# Altium footprint library 2.10-LQFP封装.PcbLib: 97 footprints (part 7 of 7)
Each footprint in its own frame and in the unit in brackets; x right, y up, seen from the top. Pads: shape width x height; smd on the part's side, far side on the other; paste and mask are expansions set on the pad; w line width, h text height; cw(c..) or ccw(c..) is an arc to the next point about the centre after c.
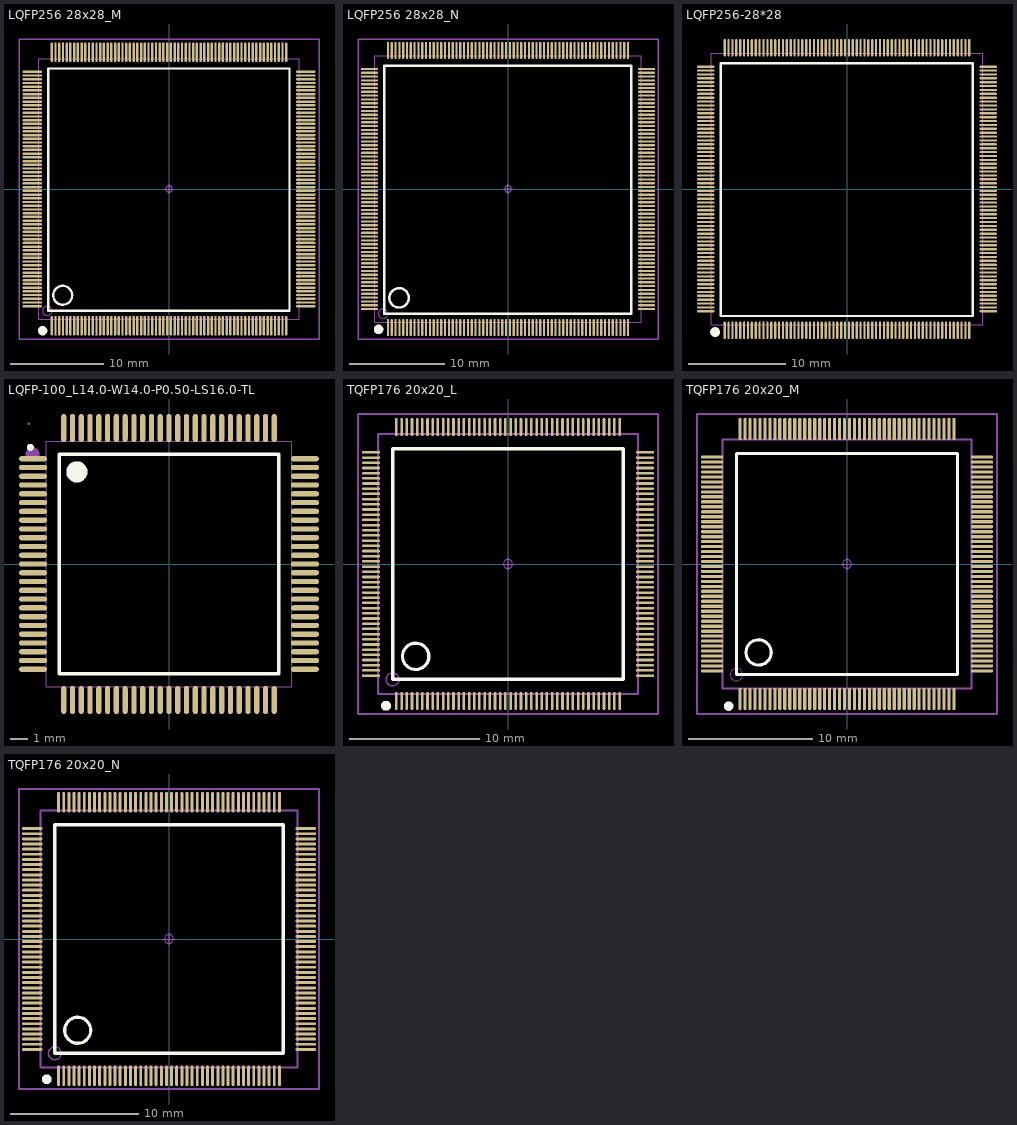
[diagram p6: the footprints below, top view; thin cyan lines are the x and y axes]

## LQFP256 28x28_M [mm] "256脚，体宽28x28mm，脚距0.4mm      淘宝ID:黄晶宝石"
pads (256):
  oval 0.26x2.1 smd: 1(-12.6,-14.702) 2(-12.2,-14.702) 3(-11.8,-14.702) 4(-11.4,-14.702) 5(-11,-14.702) 6(-10.6,-14.702) 7(-10.2,-14.702) 8(-9.8,-14.702) 9(-9.4,-14.702) 10(-9,-14.702) 11(-8.6,-14.702) 12(-8.2,-14.702) 13(-7.8,-14.702) 14(-7.4,-14.702) 15(-7,-14.702) 16(-6.6,-14.702) 17(-6.2,-14.702) 18(-5.8,-14.702) 19(-5.4,-14.702) 20(-5,-14.702) 21(-4.6,-14.702) 22(-4.2,-14.702) 23(-3.8,-14.702) 24(-3.4,-14.702) 25(-3,-14.702) 26(-2.6,-14.702) 27(-2.2,-14.702) 28(-1.8,-14.702) 29(-1.4,-14.702) 30(-1,-14.702) 31(-0.6,-14.702) 32(-0.2,-14.702) 33(0.2,-14.702) 34(0.6,-14.702) 35(1,-14.702) 36(1.4,-14.702) 37(1.8,-14.702) 38(2.2,-14.702) 39(2.6,-14.702) 40(3,-14.702) 41(3.4,-14.702) 42(3.8,-14.702) 43(4.2,-14.702) 44(4.6,-14.702) 45(5,-14.702) 46(5.4,-14.702) 47(5.8,-14.702) 48(6.2,-14.702) 49(6.6,-14.702) 50(7,-14.702) 51(7.4,-14.702) 52(7.8,-14.702) 53(8.2,-14.702) 54(8.6,-14.702) 55(9,-14.702) 56(9.4,-14.702) 57(9.8,-14.702) 58(10.2,-14.702) 59(10.6,-14.702) 60(11,-14.702) 61(11.4,-14.702) 62(11.8,-14.702) 63(12.2,-14.702) 64(12.6,-14.702) 129(12.6,14.702) 130(12.2,14.702) 131(11.8,14.702) 132(11.4,14.702) 133(11,14.702) 134(10.6,14.702) 135(10.2,14.702) 136(9.8,14.702) 137(9.4,14.702) 138(9,14.702) 139(8.6,14.702) 140(8.2,14.702) 141(7.8,14.702) 142(7.4,14.702) 143(7,14.702) 144(6.6,14.702) 145(6.2,14.702) 146(5.8,14.702) 147(5.4,14.702) 148(5,14.702) 149(4.6,14.702) 150(4.2,14.702) 151(3.8,14.702) 152(3.4,14.702) 153(3,14.702) 154(2.6,14.702) 155(2.2,14.702) 156(1.8,14.702) 157(1.4,14.702) 158(1,14.702) 159(0.6,14.702) 160(0.2,14.702) 161(-0.2,14.702) 162(-0.6,14.702) 163(-1,14.702) 164(-1.4,14.702) 165(-1.8,14.702) 166(-2.2,14.702) 167(-2.6,14.702) 168(-3,14.702) 169(-3.4,14.702) 170(-3.8,14.702) 171(-4.2,14.702) 172(-4.6,14.702) 173(-5,14.702) 174(-5.4,14.702) 175(-5.8,14.702) 176(-6.2,14.702) 177(-6.6,14.702) 178(-7,14.702) 179(-7.4,14.702) 180(-7.8,14.702) 181(-8.2,14.702) 182(-8.6,14.702) 183(-9,14.702) 184(-9.4,14.702) 185(-9.8,14.702) 186(-10.2,14.702) 187(-10.6,14.702) 188(-11,14.702) 189(-11.4,14.702) 190(-11.8,14.702) 191(-12.2,14.702) 192(-12.6,14.702)
  oval 2.1x0.26 smd: 65(14.702,-12.6) 66(14.702,-12.2) 67(14.702,-11.8) 68(14.702,-11.4) 69(14.702,-11) 70(14.702,-10.6) 71(14.702,-10.2) 72(14.702,-9.8) 73(14.702,-9.4) 74(14.702,-9) 75(14.702,-8.6) 76(14.702,-8.2) 77(14.702,-7.8) 78(14.702,-7.4) 79(14.702,-7) 80(14.702,-6.6) 81(14.702,-6.2) 82(14.702,-5.8) 83(14.702,-5.4) 84(14.702,-5) 85(14.702,-4.6) 86(14.702,-4.2) 87(14.702,-3.8) 88(14.702,-3.4) 89(14.702,-3) 90(14.702,-2.6) 91(14.702,-2.2) 92(14.702,-1.8) 93(14.702,-1.4) 94(14.702,-1) 95(14.702,-0.6) 96(14.702,-0.2) 97(14.702,0.2) 98(14.702,0.6) 99(14.702,1) 100(14.702,1.4) 101(14.702,1.8) 102(14.702,2.2) 103(14.702,2.6) 104(14.702,3) 105(14.702,3.4) 106(14.702,3.8) 107(14.702,4.2) 108(14.702,4.6) 109(14.702,5) 110(14.702,5.4) 111(14.702,5.8) 112(14.702,6.2) 113(14.702,6.6) 114(14.702,7) 115(14.702,7.4) 116(14.702,7.8) 117(14.702,8.2) 118(14.702,8.6) 119(14.702,9) 120(14.702,9.4) 121(14.702,9.8) 122(14.702,10.2) 123(14.702,10.6) 124(14.702,11) 125(14.702,11.4) 126(14.702,11.8) 127(14.702,12.2) 128(14.702,12.6) 193(-14.702,12.6) 194(-14.702,12.2) 195(-14.702,11.8) 196(-14.702,11.4) 197(-14.702,11) 198(-14.702,10.6) 199(-14.702,10.2) 200(-14.702,9.8) 201(-14.702,9.4) 202(-14.702,9) 203(-14.702,8.6) 204(-14.702,8.2) 205(-14.702,7.8) 206(-14.702,7.4) 207(-14.702,7) 208(-14.702,6.6) 209(-14.702,6.2) 210(-14.702,5.8) 211(-14.702,5.4) 212(-14.702,5) 213(-14.702,4.6) 214(-14.702,4.2) 215(-14.702,3.8) 216(-14.702,3.4) 217(-14.702,3) 218(-14.702,2.6) 219(-14.702,2.2) 220(-14.702,1.8) 221(-14.702,1.4) 222(-14.702,1) 223(-14.702,0.6) 224(-14.702,0.2) 225(-14.702,-0.2) 226(-14.702,-0.6) 227(-14.702,-1) 228(-14.702,-1.4) 229(-14.702,-1.8) 230(-14.702,-2.2) 231(-14.702,-2.6) 232(-14.702,-3) 233(-14.702,-3.4) 234(-14.702,-3.8) 235(-14.702,-4.2) 236(-14.702,-4.6) 237(-14.702,-5) 238(-14.702,-5.4) 239(-14.702,-5.8) 240(-14.702,-6.2) 241(-14.702,-6.6) 242(-14.702,-7) 243(-14.702,-7.4) 244(-14.702,-7.8) 245(-14.702,-8.2) 246(-14.702,-8.6) 247(-14.702,-9) 248(-14.702,-9.4) 249(-14.702,-9.8) 250(-14.702,-10.2) 251(-14.702,-10.6) 252(-14.702,-11) 253(-14.702,-11.4) 254(-14.702,-11.8) 255(-14.702,-12.2) 256(-14.702,-12.6)
Top Overlay:
  circle w0.508: c-13.589,-15.24 r0.25
  circle w0.254: c-11.43,-11.43 r1.016
  lines w0.254: -13,-13.081 12.954,-13.081 12.954,12.954 -13,12.954 -13,-13.081
Mechanical 13:
  circle w0.1: c-13.1,-13.1 r0.5
  lines w0.1: -14,-14 14,-14 14,14 -14,14 -14,-14
Mechanical 15:
  circle w0.05: c0,0 r0.35
  lines w0.05: -0.5,0 0.5,0 ; 0,-0.5 0,0.5
  lines w0.15: -16.129,-16.129 16.129,-16.129 16.129,16.129 -16.129,16.129 -16.129,-16.129
3D body "LQFP256-28x28.STEP": height 1.45, standoff -0.01, extent -15.003,-15.003 15.003,15.003

## LQFP256 28x28_N [mm] "256脚，体宽28x28mm，脚距0.4mm       淘宝ID:黄晶宝石"
pads (256):
  oval 0.23x1.8 smd: 1(-12.605,-14.548) 2(-12.205,-14.548) 3(-11.805,-14.548) 4(-11.405,-14.548) 5(-11.005,-14.548) 6(-10.605,-14.548) 7(-10.205,-14.548) 8(-9.805,-14.548) 9(-9.405,-14.548) 10(-9.005,-14.548) 11(-8.605,-14.548) 12(-8.205,-14.548) 13(-7.805,-14.548) 14(-7.405,-14.548) 15(-7.005,-14.548) 16(-6.605,-14.548) 17(-6.205,-14.548) 18(-5.805,-14.548) 19(-5.405,-14.548) 20(-5.005,-14.548) 21(-4.605,-14.548) 22(-4.205,-14.548) 23(-3.805,-14.548) 24(-3.405,-14.548) 25(-3.005,-14.548) 26(-2.605,-14.548) 27(-2.205,-14.548) 28(-1.805,-14.548) 29(-1.405,-14.548) 30(-1.005,-14.548) 31(-0.605,-14.548) 32(-0.205,-14.548) 33(0.195,-14.548) 34(0.595,-14.548) 35(0.995,-14.548) 36(1.395,-14.548) 37(1.795,-14.548) 38(2.195,-14.548) 39(2.595,-14.548) 40(2.995,-14.548) 41(3.395,-14.548) 42(3.795,-14.548) 43(4.195,-14.548) 44(4.595,-14.548) 45(4.995,-14.548) 46(5.395,-14.548) 47(5.795,-14.548) 48(6.195,-14.548) 49(6.595,-14.548) 50(6.995,-14.548) 51(7.395,-14.548) 52(7.795,-14.548) 53(8.195,-14.548) 54(8.595,-14.548) 55(8.995,-14.548) 56(9.395,-14.548) 57(9.795,-14.548) 58(10.195,-14.548) 59(10.595,-14.548) 60(10.995,-14.548) 61(11.395,-14.548) 62(11.795,-14.548) 63(12.195,-14.548) 64(12.595,-14.548) 129(12.595,14.551) 130(12.195,14.551) 131(11.795,14.551) 132(11.395,14.551) 133(10.995,14.551) 134(10.595,14.551) 135(10.195,14.551) 136(9.795,14.551) 137(9.395,14.551) 138(8.995,14.551) 139(8.595,14.551) 140(8.195,14.551) 141(7.795,14.551) 142(7.395,14.551) 143(6.995,14.551) 144(6.595,14.551) 145(6.195,14.551) 146(5.795,14.551) 147(5.395,14.551) 148(4.995,14.551) 149(4.595,14.551) 150(4.195,14.551) 151(3.795,14.551) 152(3.395,14.551) 153(2.995,14.551) 154(2.595,14.551) 155(2.195,14.551) 156(1.795,14.551) 157(1.395,14.551) 158(0.995,14.551) 159(0.595,14.551) 160(0.195,14.551) 161(-0.205,14.551) 162(-0.605,14.551) 163(-1.005,14.551) 164(-1.405,14.551) 165(-1.805,14.551) 166(-2.205,14.551) 167(-2.605,14.551) 168(-3.005,14.551) 169(-3.405,14.551) 170(-3.805,14.551) 171(-4.205,14.551) 172(-4.605,14.551) 173(-5.005,14.551) 174(-5.405,14.551) 175(-5.805,14.551) 176(-6.205,14.551) 177(-6.605,14.551) 178(-7.005,14.551) 179(-7.405,14.551) 180(-7.805,14.551) 181(-8.205,14.551) 182(-8.605,14.551) 183(-9.005,14.551) 184(-9.405,14.551) 185(-9.805,14.551) 186(-10.205,14.551) 187(-10.605,14.551) 188(-11.005,14.551) 189(-11.405,14.551) 190(-11.805,14.551) 191(-12.205,14.551) 192(-12.605,14.551)
  oval 1.8x0.23 smd: 65(14.544,-12.598) 66(14.544,-12.198) 67(14.544,-11.798) 68(14.544,-11.398) 69(14.544,-10.998) 70(14.544,-10.598) 71(14.544,-10.198) 72(14.544,-9.798) 73(14.544,-9.398) 74(14.544,-8.998) 75(14.544,-8.598) 76(14.544,-8.198) 77(14.544,-7.798) 78(14.544,-7.398) 79(14.544,-6.998) 80(14.544,-6.598) 81(14.544,-6.198) 82(14.544,-5.798) 83(14.544,-5.398) 84(14.544,-4.998) 85(14.544,-4.598) 86(14.544,-4.198) 87(14.544,-3.798) 88(14.544,-3.398) 89(14.544,-2.998) 90(14.544,-2.598) 91(14.544,-2.198) 92(14.544,-1.798) 93(14.544,-1.398) 94(14.544,-0.998) 95(14.544,-0.598) 96(14.544,-0.198) 97(14.544,0.202) 98(14.544,0.602) 99(14.544,1.002) 100(14.544,1.402) 101(14.544,1.802) 102(14.544,2.202) 103(14.544,2.602) 104(14.544,3.002) 105(14.544,3.402) 106(14.544,3.802) 107(14.544,4.202) 108(14.544,4.602) 109(14.544,5.002) 110(14.544,5.402) 111(14.544,5.802) 112(14.544,6.202) 113(14.544,6.602) 114(14.544,7.002) 115(14.544,7.402) 116(14.544,7.802) 117(14.544,8.202) 118(14.544,8.602) 119(14.544,9.002) 120(14.544,9.402) 121(14.544,9.802) 122(14.544,10.202) 123(14.544,10.602) 124(14.544,11.002) 125(14.544,11.402) 126(14.544,11.802) 127(14.544,12.202) 128(14.544,12.602) 193(-14.554,12.602) 194(-14.554,12.202) 195(-14.554,11.802) 196(-14.554,11.402) 197(-14.554,11.002) 198(-14.554,10.602) 199(-14.554,10.202) 200(-14.554,9.802) 201(-14.554,9.402) 202(-14.554,9.002) 203(-14.554,8.602) 204(-14.554,8.202) 205(-14.554,7.802) 206(-14.554,7.402) 207(-14.554,7.002) 208(-14.554,6.602) 209(-14.554,6.202) 210(-14.554,5.802) 211(-14.554,5.402) 212(-14.554,5.002) 213(-14.554,4.602) 214(-14.554,4.202) 215(-14.554,3.802) 216(-14.554,3.402) 217(-14.554,3.002) 218(-14.554,2.602) 219(-14.554,2.202) 220(-14.554,1.802) 221(-14.554,1.402) 222(-14.554,1.002) 223(-14.554,0.602) 224(-14.554,0.202) 225(-14.554,-0.198) 226(-14.554,-0.598) 227(-14.554,-0.998) 228(-14.554,-1.398) 229(-14.554,-1.798) 230(-14.554,-2.198) 231(-14.554,-2.598) 232(-14.554,-2.998) 233(-14.554,-3.398) 234(-14.554,-3.798) 235(-14.554,-4.198) 236(-14.554,-4.598) 237(-14.554,-4.998) 238(-14.554,-5.398) 239(-14.554,-5.798) 240(-14.554,-6.198) 241(-14.554,-6.598) 242(-14.554,-6.998) 243(-14.554,-7.398) 244(-14.554,-7.798) 245(-14.554,-8.198) 246(-14.554,-8.598) 247(-14.554,-8.998) 248(-14.554,-9.398) 249(-14.554,-9.798) 250(-14.554,-10.198) 251(-14.554,-10.598) 252(-14.554,-10.998) 253(-14.554,-11.398) 254(-14.554,-11.798) 255(-14.554,-12.198) 256(-14.554,-12.598)
Top Overlay:
  circle w0.508: c-13.589,-14.732 r0.25
  circle w0.254: c-11.435,-11.428 r1.016
  lines w0.254: -13.005,-13.079 12.949,-13.079 12.949,12.956 -13.005,12.956 -13.005,-13.079
Mechanical 13:
  circle w0.1: c-13.105,-13.098 r0.5
  lines w0.1: -14.005,-13.998 13.995,-13.998 13.995,14.002 -14.005,14.002 -14.005,-13.998
Mechanical 15:
  circle w0.05: c-0.005,0.002 r0.35
  lines w0.05: -0.505,0.002 0.495,0.002 ; -0.005,-0.498 -0.005,0.502
  lines w0.15: -15.748,-15.748 15.748,-15.748 15.748,15.748 -15.748,15.748 -15.748,-15.748
3D body "LQFP256-28x28.STEP": height 1.45, standoff -0.01, extent -15.008,-15.001 14.998,15.004

## LQFP256-28*28 [mm] "28x28mm，0.4mm          淘宝ID:黄晶宝石"
pads (256):
  oval 0.23x1.8 smd: 1(-12.605,-14.548) 2(-12.205,-14.548) 3(-11.805,-14.548) 4(-11.405,-14.548) 5(-11.005,-14.548) 6(-10.605,-14.548) 7(-10.205,-14.548) 8(-9.805,-14.548) 9(-9.405,-14.548) 10(-9.005,-14.548) 11(-8.605,-14.548) 12(-8.205,-14.548) 13(-7.805,-14.548) 14(-7.405,-14.548) 15(-7.005,-14.548) 16(-6.605,-14.548) 17(-6.205,-14.548) 18(-5.805,-14.548) 19(-5.405,-14.548) 20(-5.005,-14.548) 21(-4.605,-14.548) 22(-4.205,-14.548) 23(-3.805,-14.548) 24(-3.405,-14.548) 25(-3.005,-14.548) 26(-2.605,-14.548) 27(-2.205,-14.548) 28(-1.805,-14.548) 29(-1.405,-14.548) 30(-1.005,-14.548) 31(-0.605,-14.548) 32(-0.205,-14.548) 33(0.195,-14.548) 34(0.595,-14.548) 35(0.995,-14.548) 36(1.395,-14.548) 37(1.795,-14.548) 38(2.195,-14.548) 39(2.595,-14.548) 40(2.995,-14.548) 41(3.395,-14.548) 42(3.795,-14.548) 43(4.195,-14.548) 44(4.595,-14.548) 45(4.995,-14.548) 46(5.395,-14.548) 47(5.795,-14.548) 48(6.195,-14.548) 49(6.595,-14.548) 50(6.995,-14.548) 51(7.395,-14.548) 52(7.795,-14.548) 53(8.195,-14.548) 54(8.595,-14.548) 55(8.995,-14.548) 56(9.395,-14.548) 57(9.795,-14.548) 58(10.195,-14.548) 59(10.595,-14.548) 60(10.995,-14.548) 61(11.395,-14.548) 62(11.795,-14.548) 63(12.195,-14.548) 64(12.595,-14.548) 129(12.595,14.551) 130(12.195,14.551) 131(11.795,14.551) 132(11.395,14.551) 133(10.995,14.551) 134(10.595,14.551) 135(10.195,14.551) 136(9.795,14.551) 137(9.395,14.551) 138(8.995,14.551) 139(8.595,14.551) 140(8.195,14.551) 141(7.795,14.551) 142(7.395,14.551) 143(6.995,14.551) 144(6.595,14.551) 145(6.195,14.551) 146(5.795,14.551) 147(5.395,14.551) 148(4.995,14.551) 149(4.595,14.551) 150(4.195,14.551) 151(3.795,14.551) 152(3.395,14.551) 153(2.995,14.551) 154(2.595,14.551) 155(2.195,14.551) 156(1.795,14.551) 157(1.395,14.551) 158(0.995,14.551) 159(0.595,14.551) 160(0.195,14.551) 161(-0.205,14.551) 162(-0.605,14.551) 163(-1.005,14.551) 164(-1.405,14.551) 165(-1.805,14.551) 166(-2.205,14.551) 167(-2.605,14.551) 168(-3.005,14.551) 169(-3.405,14.551) 170(-3.805,14.551) 171(-4.205,14.551) 172(-4.605,14.551) 173(-5.005,14.551) 174(-5.405,14.551) 175(-5.805,14.551) 176(-6.205,14.551) 177(-6.605,14.551) 178(-7.005,14.551) 179(-7.405,14.551) 180(-7.805,14.551) 181(-8.205,14.551) 182(-8.605,14.551) 183(-9.005,14.551) 184(-9.405,14.551) 185(-9.805,14.551) 186(-10.205,14.551) 187(-10.605,14.551) 188(-11.005,14.551) 189(-11.405,14.551) 190(-11.805,14.551) 191(-12.205,14.551) 192(-12.605,14.551)
  oval 1.8x0.23 smd: 65(14.544,-12.598) 66(14.544,-12.198) 67(14.544,-11.798) 68(14.544,-11.398) 69(14.544,-10.998) 70(14.544,-10.598) 71(14.544,-10.198) 72(14.544,-9.798) 73(14.544,-9.398) 74(14.544,-8.998) 75(14.544,-8.598) 76(14.544,-8.198) 77(14.544,-7.798) 78(14.544,-7.398) 79(14.544,-6.998) 80(14.544,-6.598) 81(14.544,-6.198) 82(14.544,-5.798) 83(14.544,-5.398) 84(14.544,-4.998) 85(14.544,-4.598) 86(14.544,-4.198) 87(14.544,-3.798) 88(14.544,-3.398) 89(14.544,-2.998) 90(14.544,-2.598) 91(14.544,-2.198) 92(14.544,-1.798) 93(14.544,-1.398) 94(14.544,-0.998) 95(14.544,-0.598) 96(14.544,-0.198) 97(14.544,0.202) 98(14.544,0.602) 99(14.544,1.002) 100(14.544,1.402) 101(14.544,1.802) 102(14.544,2.202) 103(14.544,2.602) 104(14.544,3.002) 105(14.544,3.402) 106(14.544,3.802) 107(14.544,4.202) 108(14.544,4.602) 109(14.544,5.002) 110(14.544,5.402) 111(14.544,5.802) 112(14.544,6.202) 113(14.544,6.602) 114(14.544,7.002) 115(14.544,7.402) 116(14.544,7.802) 117(14.544,8.202) 118(14.544,8.602) 119(14.544,9.002) 120(14.544,9.402) 121(14.544,9.802) 122(14.544,10.202) 123(14.544,10.602) 124(14.544,11.002) 125(14.544,11.402) 126(14.544,11.802) 127(14.544,12.202) 128(14.544,12.602) 193(-14.554,12.602) 194(-14.554,12.202) 195(-14.554,11.802) 196(-14.554,11.402) 197(-14.554,11.002) 198(-14.554,10.602) 199(-14.554,10.202) 200(-14.554,9.802) 201(-14.554,9.402) 202(-14.554,9.002) 203(-14.554,8.602) 204(-14.554,8.202) 205(-14.554,7.802) 206(-14.554,7.402) 207(-14.554,7.002) 208(-14.554,6.602) 209(-14.554,6.202) 210(-14.554,5.802) 211(-14.554,5.402) 212(-14.554,5.002) 213(-14.554,4.602) 214(-14.554,4.202) 215(-14.554,3.802) 216(-14.554,3.402) 217(-14.554,3.002) 218(-14.554,2.602) 219(-14.554,2.202) 220(-14.554,1.802) 221(-14.554,1.402) 222(-14.554,1.002) 223(-14.554,0.602) 224(-14.554,0.202) 225(-14.554,-0.198) 226(-14.554,-0.598) 227(-14.554,-0.998) 228(-14.554,-1.398) 229(-14.554,-1.798) 230(-14.554,-2.198) 231(-14.554,-2.598) 232(-14.554,-2.998) 233(-14.554,-3.398) 234(-14.554,-3.798) 235(-14.554,-4.198) 236(-14.554,-4.598) 237(-14.554,-4.998) 238(-14.554,-5.398) 239(-14.554,-5.798) 240(-14.554,-6.198) 241(-14.554,-6.598) 242(-14.554,-6.998) 243(-14.554,-7.398) 244(-14.554,-7.798) 245(-14.554,-8.198) 246(-14.554,-8.598) 247(-14.554,-8.998) 248(-14.554,-9.398) 249(-14.554,-9.798) 250(-14.554,-10.198) 251(-14.554,-10.598) 252(-14.554,-10.998) 253(-14.554,-11.398) 254(-14.554,-11.798) 255(-14.554,-12.198) 256(-14.554,-12.598)
Top Overlay:
  circle w0.508: c-13.589,-14.732 r0.25
  lines w0.254: -13.005,-13.079 -13.005,12.956 12.949,12.956 12.949,-13.079 -13.005,-13.079
Mechanical 13:
  lines w0.1: -14.005,-13.998 -14.005,14.002 13.995,14.002 13.995,-13.998 -14.005,-13.998
3D body "LQFP256-28x28.STEP": height 1.45, standoff 0, extent -14.986,-14.986 15.02,15.02

## LQFP-100_L14.0-W14.0-P0.50-LS16.0-TL [mm]
pads (100):
  oval 1.6x0.3 smd: 1(-7.75,6) 2(-7.75,5.5) 3(-7.75,5) 4(-7.75,4.5) 5(-7.75,4) 6(-7.75,3.5) 7(-7.75,3) 8(-7.75,2.5) 9(-7.75,2) 10(-7.75,1.5) 11(-7.75,1) 12(-7.75,0.5) 13(-7.75,0) 14(-7.75,-0.5) 15(-7.75,-1) 16(-7.75,-1.5) 17(-7.75,-2) 18(-7.75,-2.5) 19(-7.75,-3) 20(-7.75,-3.5) 21(-7.75,-4) 22(-7.75,-4.5) 23(-7.75,-5) 24(-7.75,-5.5) 25(-7.75,-6) 51(7.75,-6) 52(7.75,-5.5) 53(7.75,-5) 54(7.75,-4.5) 55(7.75,-4) 56(7.75,-3.5) 57(7.75,-3) 58(7.75,-2.5) 59(7.75,-2) 60(7.75,-1.5) 61(7.75,-1) 62(7.75,-0.5) 63(7.75,0) 64(7.75,0.5) 65(7.75,1) 66(7.75,1.5) 67(7.75,2) 68(7.75,2.5) 69(7.75,3) 70(7.75,3.5) 71(7.75,4) 72(7.75,4.5) 73(7.75,5) 74(7.75,5.5) 75(7.75,6)
  oval 0.3x1.6 smd: 26(-6,-7.75) 27(-5.5,-7.75) 28(-5,-7.75) 29(-4.5,-7.75) 30(-4,-7.75) 31(-3.5,-7.75) 32(-3,-7.75) 33(-2.5,-7.75) 34(-2,-7.75) 35(-1.5,-7.75) 36(-1,-7.75) 37(-0.5,-7.75) 38(0,-7.75) 39(0.5,-7.75) 40(1,-7.75) 41(1.5,-7.75) 42(2,-7.75) 43(2.5,-7.75) 44(3,-7.75) 45(3.5,-7.75) 46(4,-7.75) 47(4.5,-7.75) 48(5,-7.75) 49(5.5,-7.75) 50(6,-7.75) 76(6,7.75) 77(5.5,7.75) 78(5,7.75) 79(4.5,7.75) 80(4,7.75) 81(3.5,7.75) 82(3,7.75) 83(2.5,7.75) 84(2,7.75) 85(1.5,7.75) 86(1,7.75) 87(0.5,7.75) 88(0,7.75) 89(-0.5,7.75) 90(-1,7.75) 91(-1.5,7.75) 92(-2,7.75) 93(-2.5,7.75) 94(-3,7.75) 95(-3.5,7.75) 96(-4,7.75) 97(-4.5,7.75) 98(-5,7.75) 99(-5.5,7.75) 100(-6,7.75)
Top Overlay:
  lines w0.2: -7.8,6.648 cw(c-7.9,6.648) -7.8,6.649 ; -6.25,-6.25 -6.25,6.25 6.25,6.25 6.25,-6.25 -6.25,-6.25
  lines w0.6: -4.95,5.245 cw(c-5.25,5.248) -4.95,5.25
Mechanical 6:
  circle w0.4: c-7.78,6.25 r0.2
Mechanical 15:
  drawing of 205 lines, arcs and shapes, not listed

## TQFP176 20x20_L [mm] "176脚，体宽：20x20mm, 脚距：0.4mm      淘宝ID:黄晶宝石"
height 1.6
pads (176):
  oval 0.2x1.4 smd: 1(-8.6,-10.552) 2(-8.2,-10.552) 3(-7.8,-10.552) 4(-7.4,-10.552) 5(-7,-10.552) 6(-6.6,-10.552) 7(-6.2,-10.552) 8(-5.8,-10.552) 9(-5.4,-10.552) 10(-5,-10.552) 11(-4.6,-10.552) 12(-4.2,-10.552) 13(-3.8,-10.552) 14(-3.4,-10.552) 15(-3,-10.552) 16(-2.6,-10.552) 17(-2.2,-10.552) 18(-1.8,-10.552) 19(-1.4,-10.552) 20(-1,-10.552) 21(-0.6,-10.552) 22(-0.2,-10.552) 23(0.2,-10.552) 24(0.6,-10.552) 25(1,-10.552) 26(1.4,-10.552) 27(1.8,-10.552) 28(2.2,-10.552) 29(2.6,-10.552) 30(3,-10.552) 31(3.4,-10.552) 32(3.8,-10.552) 33(4.2,-10.552) 34(4.6,-10.552) 35(5,-10.552) 36(5.4,-10.552) 37(5.8,-10.552) 38(6.2,-10.552) 39(6.6,-10.552) 40(7,-10.552) 41(7.4,-10.552) 42(7.8,-10.552) 43(8.2,-10.552) 44(8.6,-10.552) 89(8.6,10.552) 90(8.2,10.552) 91(7.8,10.552) 92(7.4,10.552) 93(7,10.552) 94(6.6,10.552) 95(6.2,10.552) 96(5.8,10.552) 97(5.4,10.552) 98(5,10.552) 99(4.6,10.552) 100(4.2,10.552) 101(3.8,10.552) 102(3.4,10.552) 103(3,10.552) 104(2.6,10.552) 105(2.2,10.552) 106(1.8,10.552) 107(1.4,10.552) 108(1,10.552) 109(0.6,10.552) 110(0.2,10.552) 111(-0.2,10.552) 112(-0.6,10.552) 113(-1,10.552) 114(-1.4,10.552) 115(-1.8,10.552) 116(-2.2,10.552) 117(-2.6,10.552) 118(-3,10.552) 119(-3.4,10.552) 120(-3.8,10.552) 121(-4.2,10.552) 122(-4.6,10.552) 123(-5,10.552) 124(-5.4,10.552) 125(-5.8,10.552) 126(-6.2,10.552) 127(-6.6,10.552) 128(-7,10.552) 129(-7.4,10.552) 130(-7.8,10.552) 131(-8.2,10.552) 132(-8.6,10.552)
  oval 1.4x0.2 smd: 45(10.552,-8.6) 46(10.552,-8.2) 47(10.552,-7.8) 48(10.552,-7.4) 49(10.552,-7) 50(10.552,-6.6) 51(10.552,-6.2) 52(10.552,-5.8) 53(10.552,-5.4) 54(10.552,-5) 55(10.552,-4.6) 56(10.552,-4.2) 57(10.552,-3.8) 58(10.552,-3.4) 59(10.552,-3) 60(10.552,-2.6) 61(10.552,-2.2) 62(10.552,-1.8) 63(10.552,-1.4) 64(10.552,-1) 65(10.552,-0.6) 66(10.552,-0.2) 67(10.552,0.2) 68(10.552,0.6) 69(10.552,1) 70(10.552,1.4) 71(10.552,1.8) 72(10.552,2.2) 73(10.552,2.6) 74(10.552,3) 75(10.552,3.4) 76(10.552,3.8) 77(10.552,4.2) 78(10.552,4.6) 79(10.552,5) 80(10.552,5.4) 81(10.552,5.8) 82(10.552,6.2) 83(10.552,6.6) 84(10.552,7) 85(10.552,7.4) 86(10.552,7.8) 87(10.552,8.2) 88(10.552,8.6) 133(-10.552,8.6) 134(-10.552,8.2) 135(-10.552,7.8) 136(-10.552,7.4) 137(-10.552,7) 138(-10.552,6.6) 139(-10.552,6.2) 140(-10.552,5.8) 141(-10.552,5.4) 142(-10.552,5) 143(-10.552,4.6) 144(-10.552,4.2) 145(-10.552,3.8) 146(-10.552,3.4) 147(-10.552,3) 148(-10.552,2.6) 149(-10.552,2.2) 150(-10.552,1.8) 151(-10.552,1.4) 152(-10.552,1) 153(-10.552,0.6) 154(-10.552,0.2) 155(-10.552,-0.2) 156(-10.552,-0.6) 157(-10.552,-1) 158(-10.552,-1.4) 159(-10.552,-1.8) 160(-10.552,-2.2) 161(-10.552,-2.6) 162(-10.552,-3) 163(-10.552,-3.4) 164(-10.552,-3.8) 165(-10.552,-4.2) 166(-10.552,-4.6) 167(-10.552,-5) 168(-10.552,-5.4) 169(-10.552,-5.8) 170(-10.552,-6.2) 171(-10.552,-6.6) 172(-10.552,-7) 173(-10.552,-7.4) 174(-10.552,-7.8) 175(-10.552,-8.2) 176(-10.552,-8.6)
Top Overlay:
  circle w0.508: c-9.398,-10.922 r0.127
  circle w0.254: c-7.112,-7.112 r1.016
  lines w0.254: -8.89,-8.89 8.89,-8.89 8.89,8.89 -8.89,8.89 -8.89,-8.89
Mechanical 13:
  circle w0.1: c-8.894,-8.894 r0.5
  lines w0.15: -10,-10 -10,10 10,10 10,-10 -10,-10
Mechanical 15:
  circle w0.05: c0,0 r0.35
  lines w0.05: -0.5,0 0.5,0 ; 0,-0.5 0,0.5
  lines w0.15: -11.557,-11.557 11.557,-11.557 11.557,11.557 -11.557,11.557 -11.557,-11.557
3D body "LQFP176-20x20.STEP": height 1.45, standoff -0.01, extent -11.003,-11.003 11.003,11.003

## TQFP176 20x20_M [mm] "176脚，体宽：20x20mm, 脚距：0.4mm          淘宝ID:黄晶宝石"
height 1.6
pads (176):
  oval 0.26x1.8 smd: 1(-8.6,-10.857) 2(-8.2,-10.857) 3(-7.8,-10.857) 4(-7.4,-10.857) 5(-7,-10.857) 6(-6.6,-10.857) 7(-6.2,-10.857) 8(-5.8,-10.857) 9(-5.4,-10.857) 10(-5,-10.857) 11(-4.6,-10.857) 12(-4.2,-10.857) 13(-3.8,-10.857) 14(-3.4,-10.857) 15(-3,-10.857) 16(-2.6,-10.857) 17(-2.2,-10.857) 18(-1.8,-10.857) 19(-1.4,-10.857) 20(-1,-10.857) 21(-0.6,-10.857) 22(-0.2,-10.857) 23(0.2,-10.857) 24(0.6,-10.857) 25(1,-10.857) 26(1.4,-10.857) 27(1.8,-10.857) 28(2.2,-10.857) 29(2.6,-10.857) 30(3,-10.857) 31(3.4,-10.857) 32(3.8,-10.857) 33(4.2,-10.857) 34(4.6,-10.857) 35(5,-10.857) 36(5.4,-10.857) 37(5.8,-10.857) 38(6.2,-10.857) 39(6.6,-10.857) 40(7,-10.857) 41(7.4,-10.857) 42(7.8,-10.857) 43(8.2,-10.857) 44(8.6,-10.857) 89(8.6,10.857) 90(8.2,10.857) 91(7.8,10.857) 92(7.4,10.857) 93(7,10.857) 94(6.6,10.857) 95(6.2,10.857) 96(5.8,10.857) 97(5.4,10.857) 98(5,10.857) 99(4.6,10.857) 100(4.2,10.857) 101(3.8,10.857) 102(3.4,10.857) 103(3,10.857) 104(2.6,10.857) 105(2.2,10.857) 106(1.8,10.857) 107(1.4,10.857) 108(1,10.857) 109(0.6,10.857) 110(0.2,10.857) 111(-0.2,10.857) 112(-0.6,10.857) 113(-1,10.857) 114(-1.4,10.857) 115(-1.8,10.857) 116(-2.2,10.857) 117(-2.6,10.857) 118(-3,10.857) 119(-3.4,10.857) 120(-3.8,10.857) 121(-4.2,10.857) 122(-4.6,10.857) 123(-5,10.857) 124(-5.4,10.857) 125(-5.8,10.857) 126(-6.2,10.857) 127(-6.6,10.857) 128(-7,10.857) 129(-7.4,10.857) 130(-7.8,10.857) 131(-8.2,10.857) 132(-8.6,10.857)
  oval 1.8x0.26 smd: 45(10.857,-8.6) 46(10.857,-8.2) 47(10.857,-7.8) 48(10.857,-7.4) 49(10.857,-7) 50(10.857,-6.6) 51(10.857,-6.2) 52(10.857,-5.8) 53(10.857,-5.4) 54(10.857,-5) 55(10.857,-4.6) 56(10.857,-4.2) 57(10.857,-3.8) 58(10.857,-3.4) 59(10.857,-3) 60(10.857,-2.6) 61(10.857,-2.2) 62(10.857,-1.8) 63(10.857,-1.4) 64(10.857,-1) 65(10.857,-0.6) 66(10.857,-0.2) 67(10.857,0.2) 68(10.857,0.6) 69(10.857,1) 70(10.857,1.4) 71(10.857,1.8) 72(10.857,2.2) 73(10.857,2.6) 74(10.857,3) 75(10.857,3.4) 76(10.857,3.8) 77(10.857,4.2) 78(10.857,4.6) 79(10.857,5) 80(10.857,5.4) 81(10.857,5.8) 82(10.857,6.2) 83(10.857,6.6) 84(10.857,7) 85(10.857,7.4) 86(10.857,7.8) 87(10.857,8.2) 88(10.857,8.6) 133(-10.857,8.6) 134(-10.857,8.2) 135(-10.857,7.8) 136(-10.857,7.4) 137(-10.857,7) 138(-10.857,6.6) 139(-10.857,6.2) 140(-10.857,5.8) 141(-10.857,5.4) 142(-10.857,5) 143(-10.857,4.6) 144(-10.857,4.2) 145(-10.857,3.8) 146(-10.857,3.4) 147(-10.857,3) 148(-10.857,2.6) 149(-10.857,2.2) 150(-10.857,1.8) 151(-10.857,1.4) 152(-10.857,1) 153(-10.857,0.6) 154(-10.857,0.2) 155(-10.857,-0.2) 156(-10.857,-0.6) 157(-10.857,-1) 158(-10.857,-1.4) 159(-10.857,-1.8) 160(-10.857,-2.2) 161(-10.857,-2.6) 162(-10.857,-3) 163(-10.857,-3.4) 164(-10.857,-3.8) 165(-10.857,-4.2) 166(-10.857,-4.6) 167(-10.857,-5) 168(-10.857,-5.4) 169(-10.857,-5.8) 170(-10.857,-6.2) 171(-10.857,-6.6) 172(-10.857,-7) 173(-10.857,-7.4) 174(-10.857,-7.8) 175(-10.857,-8.2) 176(-10.857,-8.6)
Top Overlay:
  circle w0.508: c-9.525,-11.43 r0.127
  circle w0.254: c-7.112,-7.112 r1.016
  lines w0.254: -8.89,-8.89 -8.89,8.89 8.89,8.89 8.89,-8.89 -8.89,-8.89
Mechanical 13:
  circle w0.1: c-8.894,-8.894 r0.5
  lines w0.15: -10,-10 10,-10 10,10 -10,10 -10,-10
Mechanical 15:
  circle w0.05: c0,0 r0.35
  lines w0.05: -0.5,0 0.5,0 ; 0,-0.5 0,0.5
  lines w0.15: -12.065,-12.065 -12.065,12.065 12.065,12.065 12.065,-12.065 -12.065,-12.065
3D body "LQFP176-20x20.STEP": height 1.45, standoff -0.01, extent -11.003,-11.003 11.003,11.003

## TQFP176 20x20_N [mm] "176脚，体宽：20x20mm, 脚距：0.4mm       淘宝ID:黄晶宝石"
height 1.6
pads (176):
  oval 0.23x1.6 smd: 1(-8.6,-10.654) 2(-8.2,-10.654) 3(-7.8,-10.654) 4(-7.4,-10.654) 5(-7,-10.654) 6(-6.6,-10.654) 7(-6.2,-10.654) 8(-5.8,-10.654) 9(-5.4,-10.654) 10(-5,-10.654) 11(-4.6,-10.654) 12(-4.2,-10.654) 13(-3.8,-10.654) 14(-3.4,-10.654) 15(-3,-10.654) 16(-2.6,-10.654) 17(-2.2,-10.654) 18(-1.8,-10.654) 19(-1.4,-10.654) 20(-1,-10.654) 21(-0.6,-10.654) 22(-0.2,-10.654) 23(0.2,-10.654) 24(0.6,-10.654) 25(1,-10.654) 26(1.4,-10.654) 27(1.8,-10.654) 28(2.2,-10.654) 29(2.6,-10.654) 30(3,-10.654) 31(3.4,-10.654) 32(3.8,-10.654) 33(4.2,-10.654) 34(4.6,-10.654) 35(5,-10.654) 36(5.4,-10.654) 37(5.8,-10.654) 38(6.2,-10.654) 39(6.6,-10.654) 40(7,-10.654) 41(7.4,-10.654) 42(7.8,-10.654) 43(8.2,-10.654) 44(8.6,-10.654) 89(8.6,10.654) 90(8.2,10.654) 91(7.8,10.654) 92(7.4,10.654) 93(7,10.654) 94(6.6,10.654) 95(6.2,10.654) 96(5.8,10.654) 97(5.4,10.654) 98(5,10.654) 99(4.6,10.654) 100(4.2,10.654) 101(3.8,10.654) 102(3.4,10.654) 103(3,10.654) 104(2.6,10.654) 105(2.2,10.654) 106(1.8,10.654) 107(1.4,10.654) 108(1,10.654) 109(0.6,10.654) 110(0.2,10.654) 111(-0.2,10.654) 112(-0.6,10.654) 113(-1,10.654) 114(-1.4,10.654) 115(-1.8,10.654) 116(-2.2,10.654) 117(-2.6,10.654) 118(-3,10.654) 119(-3.4,10.654) 120(-3.8,10.654) 121(-4.2,10.654) 122(-4.6,10.654) 123(-5,10.654) 124(-5.4,10.654) 125(-5.8,10.654) 126(-6.2,10.654) 127(-6.6,10.654) 128(-7,10.654) 129(-7.4,10.654) 130(-7.8,10.654) 131(-8.2,10.654) 132(-8.6,10.654)
  oval 1.6x0.23 smd: 45(10.654,-8.6) 46(10.654,-8.2) 47(10.654,-7.8) 48(10.654,-7.4) 49(10.654,-7) 50(10.654,-6.6) 51(10.654,-6.2) 52(10.654,-5.8) 53(10.654,-5.4) 54(10.654,-5) 55(10.654,-4.6) 56(10.654,-4.2) 57(10.654,-3.8) 58(10.654,-3.4) 59(10.654,-3) 60(10.654,-2.6) 61(10.654,-2.2) 62(10.654,-1.8) 63(10.654,-1.4) 64(10.654,-1) 65(10.654,-0.6) 66(10.654,-0.2) 67(10.654,0.2) 68(10.654,0.6) 69(10.654,1) 70(10.654,1.4) 71(10.654,1.8) 72(10.654,2.2) 73(10.654,2.6) 74(10.654,3) 75(10.654,3.4) 76(10.654,3.8) 77(10.654,4.2) 78(10.654,4.6) 79(10.654,5) 80(10.654,5.4) 81(10.654,5.8) 82(10.654,6.2) 83(10.654,6.6) 84(10.654,7) 85(10.654,7.4) 86(10.654,7.8) 87(10.654,8.2) 88(10.654,8.6) 133(-10.654,8.6) 134(-10.654,8.2) 135(-10.654,7.8) 136(-10.654,7.4) 137(-10.654,7) 138(-10.654,6.6) 139(-10.654,6.2) 140(-10.654,5.8) 141(-10.654,5.4) 142(-10.654,5) 143(-10.654,4.6) 144(-10.654,4.2) 145(-10.654,3.8) 146(-10.654,3.4) 147(-10.654,3) 148(-10.654,2.6) 149(-10.654,2.2) 150(-10.654,1.8) 151(-10.654,1.4) 152(-10.654,1) 153(-10.654,0.6) 154(-10.654,0.2) 155(-10.654,-0.2) 156(-10.654,-0.6) 157(-10.654,-1) 158(-10.654,-1.4) 159(-10.654,-1.8) 160(-10.654,-2.2) 161(-10.654,-2.6) 162(-10.654,-3) 163(-10.654,-3.4) 164(-10.654,-3.8) 165(-10.654,-4.2) 166(-10.654,-4.6) 167(-10.654,-5) 168(-10.654,-5.4) 169(-10.654,-5.8) 170(-10.654,-6.2) 171(-10.654,-6.6) 172(-10.654,-7) 173(-10.654,-7.4) 174(-10.654,-7.8) 175(-10.654,-8.2) 176(-10.654,-8.6)
Top Overlay:
  circle w0.508: c-9.525,-10.922 r0.127
  circle w0.254: c-7.112,-7.112 r1.016
  lines w0.254: -8.89,-8.89 8.89,-8.89 8.89,8.89 -8.89,8.89 -8.89,-8.89
Mechanical 13:
  circle w0.1: c-8.894,-8.894 r0.5
  lines w0.15: -10,-10 -10,10 10,10 10,-10 -10,-10
Mechanical 15:
  circle w0.05: c0,0 r0.35
  lines w0.05: -0.5,0 0.5,0 ; 0,-0.5 0,0.5
  lines w0.15: -11.684,-11.684 11.684,-11.684 11.684,11.684 -11.684,11.684 -11.684,-11.684
3D body "LQFP176-20x20.STEP": height 1.45, standoff -0.01, extent -11.003,-11.003 11.003,11.003